# Altium footprint library pcie.PcbLib: 3 footprints
Each footprint in its own frame and in the unit in brackets; x right, y up, seen from the top. Pads: shape width x height; smd on the part's side, far side on the other; paste and mask are expansions set on the pad; w line width, h text height; cw(c..) or ccw(c..) is an arc to the next point about the centre after c.
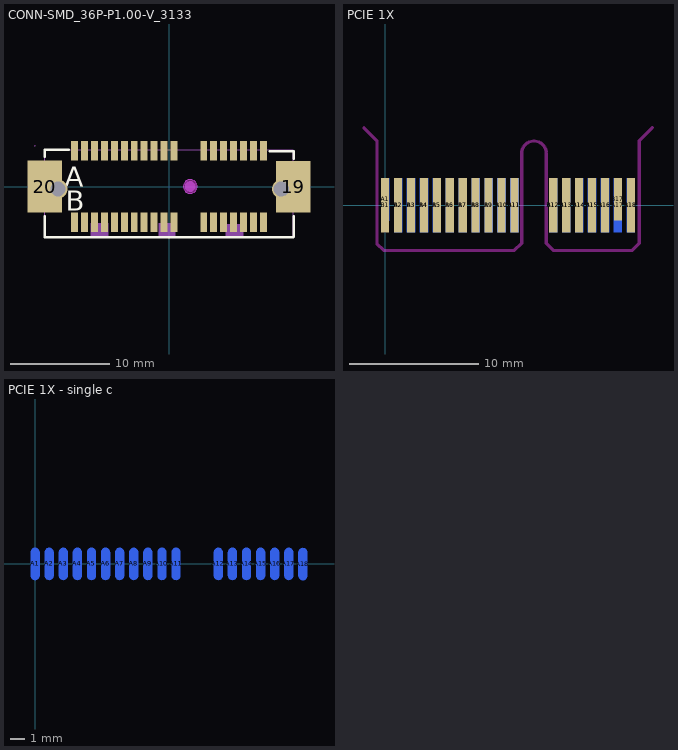
[diagram p0: the footprints below, top view; thin cyan lines are the x and y axes]

## CONN-SMD_36P-P1.00-V_3133 [mm]
pads (38):
  rect 3.5x5.2 smd: 19(12.5,-0.03) 20(-12.5,0)
  rect 0.7x2 smd: A1(-9.5,3.6) A2(-8.5,3.6) A3(-7.5,3.6) A4(-6.5,3.6) A5(-5.5,3.6) A6(-4.5,3.6) A7(-3.5,3.6) A8(-2.5,3.6) A9(-1.5,3.6) A10(-0.5,3.6) A11(0.5,3.6) A12(3.5,3.6) A13(4.5,3.6) A14(5.5,3.6) A15(6.5,3.6) A16(7.5,3.6) A17(8.5,3.6) A18(9.5,3.6) B1(-9.5,-3.6) B2(-8.5,-3.6) B3(-7.5,-3.6) B4(-6.5,-3.6) B5(-5.5,-3.6) B6(-4.5,-3.6) B7(-3.5,-3.6) B8(-2.5,-3.6) B9(-1.5,-3.6) B10(-0.5,-3.6) B11(0.5,-3.6) B12(3.5,-3.6) B13(4.5,-3.6) B14(5.5,-3.6) B15(6.5,-3.6) B16(7.5,-3.6) B17(8.5,-3.6) B18(9.5,-3.6)
via 11.303,-0.254 diameter 1.905 hole 1.524
via -11.176,-0.254 diameter 1.905 hole 1.524
Top Overlay:
  lines w0.254: -12.5,-3 -12.5,-5.1 12.5,-5.1 ; -12.5,3 -12.5,3.7 -10.081,3.7 ; 10.16,3.555 12.578,3.555 ; 12.573,-5.081 12.573,-2.98 ; 12.573,2.793 12.573,3.494
  text "A" at -10.5,0 h2.03
  text "B" at -10.369,-2.449 h2.03
Keep-Out Layer:
  board cut-out: 2.85,0 2.85,-0.092 2.802,-0.27 2.71,-0.43 2.58,-0.56 2.42,-0.652 2.242,-0.7 2.058,-0.7 1.88,-0.652 1.72,-0.56 1.59,-0.43 1.498,-0.27 1.45,-0.092 1.45,0 1.45,0.092 1.498,0.27 1.59,0.43 1.72,0.56 1.88,0.652 2.058,0.7 2.242,0.7 2.42,0.652 2.58,0.56 2.71,0.43 2.802,0.27 2.85,0.092 2.85,0
Keep-Out Layer:
  circle w0.005: c2.15,0 r0.7
  region: 2.85,0 2.85,-0.092 2.802,-0.27 2.71,-0.43 2.58,-0.56 2.42,-0.652 2.242,-0.7 2.058,-0.7 1.88,-0.652 1.72,-0.56 1.59,-0.43 1.498,-0.27 1.45,-0.092 1.45,0 1.45,0.092 1.498,0.27 1.59,0.43 1.72,0.56 1.88,0.652 2.058,0.7 2.242,0.7 2.42,0.652 2.58,0.56 2.71,0.43 2.802,0.27 2.85,0.092 2.85,0
Mechanical 1:
  circle w0.005: c2.15,0 r0.7
Mechanical 6:
  circle w0.54: c2.15,0 r0.27
  region: -7.874,-3.683 -6.096,-3.683 -6.096,-5.08 -7.874,-5.08 -7.874,-4.953
  region: -1.016,-3.683 0.635,-3.683 0.635,-5.08 -1.016,-5.08
  region: 5.715,-3.81 7.493,-3.81 7.493,-5.08 5.715,-5.08
Mechanical 15:
  drawing of 43 lines, arcs and shapes, not listed
3D body "pcie.STEP": height 11.26, standoff -0.89, extent -13.5,-5.334 13.5,3.866

## PCIE 1X [mm]
height 1.14
pads (36):
  rect 0.63x3.3 smd far side paste+0 mask+0.06: A1(0,0.45)
  rect 0.63x4.2 smd far side paste+0 mask+0.06: A2(1,0) A3(2,0) A4(3,0) A5(4,0) A6(5,0) A7(6,0) A8(7,0) A9(8,0) A10(9,0) A11(10,0) A12(13,0) A13(14,0) A14(15,0) A15(16,0) A16(17,0) A17(18,0) A18(19,-0.01)
  rect 0.63x4.2 smd paste+0 mask+0.06: B1(0,0) B2(1,0) B3(2,0) B4(3,0) B5(4,0) B6(5,0) B7(6,0) B8(7,0) B9(8,0) B10(9,0) B11(10,0) B12(13,0) B13(14,0) B14(15,0) B15(16,0) B16(17,0) B18(19,-0.01)
  rect 0.63x3.3 smd paste+0 mask+0.06: B17(18,0.45)
Keep-Out Layer:
  lines w0.254: -1.638,5.997 -0.635,4.996 -0.635,-2.974 -0.109,-3.5 10,-3.5 10.559,-2.941 10.559,4 ; 10.56,4.01 cw(c11.51,4.01) 12.46,4.01 ; 12.461,4 12.461,-2.959 13,-3.5 19.101,-3.5 19.649,-2.949 19.649,4.999 20.66,5.999

## PCIE 1X - single c [mm]
height 1.14
pads (18):
  oval 0.63x2.286 smd far side paste+0 mask+0.06: A1(0,0) A2(1,0) A3(2,0) A4(3,0) A5(4,0) A6(5,0) A7(6,0) A8(7,0) A9(8,0) A10(9,0) A11(10,0) A12(13,0) A13(14,0) A14(15,0) A15(16,0) A16(17,0) A17(18,0) A18(19,-0.01)